# Altium schematic symbol library ARJM11D7-114-AB-EW2.SchLib: 1 symbol
Pins are listed as number, name and electrical type; pins without a type are passive.

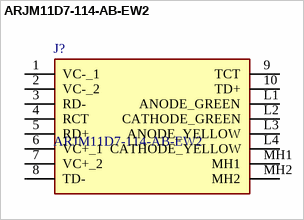
[diagram p0: symbol ARJM11D7-114-AB-EW2]

## ARJM11D7-114-AB-EW2
designator J?
Modular Connectors / Ethernet Connectors; Manufacturer_Name: ABRACON; Geometry.Height: 13.6mm; Mouser Part Number: 815-RJM11D7114ABEW2; Mouser Price/Stock: https://www.mouser.co.uk/ProductDetail/ABRACON/ARJM11D7-114-AB-EW2?qs=YCa%2FAAYMW02ICsJcHu%252BNJg%3D%3D; Manufacturer_Part_Number: ARJM11D7-114-AB-EW2; Datasheet Link: *
footprint ARJM11D7114ABEW2
pins: 1 VC-_1, 2 VC-_2, 3 RD-, 4 RCT, 5 RD+, 6 VC+_1, 7 VC+_2, 8 TD-, 9 TCT, 10 TD+, L1 ANODE_GREEN, L2 CATHODE_GREEN, L3 ANODE_YELLOW, L4 CATHODE_YELLOW, MH1, MH2